# Altium schematic symbol library HD-EMB1204-SM.SchLib: 1 symbol
Pins are listed as number, name and electrical type; pins without a type are passive.

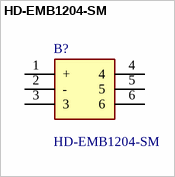
[diagram p0: symbol HD-EMB1204-SM]

## HD-EMB1204-SM
designator B?
12X4MM ERM HAPTIC 12000RPM; Manufacturer_Name: PUI Audio; Geometry.Height: 3.6mm; Mouser Part Number: 665-HD-EMB1204-SM; Mouser Price/Stock: https://www.mouser.co.uk/ProductDetail/PUI-Audio/HD-EMB1204-SM?qs=9vOqFld9vZVRpcI8oM%2FXRA%3D%3D; Manufacturer_Part_Number: HD-EMB1204-SM; Datasheet Link: https://api.puiaudio.com/filename/HD-EMB1204-SM.pdf
footprint HDEMB1204SM
pins: 1 +, 2 -, 3, 4, 5, 6